# Altium schematic symbol library 2019-09-11_09-25-43.SchLib: 2 symbols
Pins are listed as number, name and electrical type; pins without a type are passive.

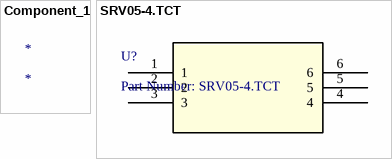
[diagram p0: symbols Component_1 to SRV05-4.TCT]

## Component_1
designator *

## SRV05-4.TCT
designator U?, comment Part Number: SRV05-4.TCT
No Description Available; Built_By: EMA_Justin; Vendor: Semtech Corporation; Copyright: Copyright (C) 2016 Accelerated Designs. All rights reserved; Manufacturer_Part_Number: SRV05-4.TCT; RefDes: RefDes; Type: DEV; Value: Value
footprint SO6_SOT23-6L
pins: 1, 2, 3, 4, 5, 6